# Altium footprint library PcbLib1.PcbLib: 75 footprints (part 1 of 5)
Each footprint in its own frame and in the unit in brackets; x right, y up, seen from the top. Pads: shape width x height; smd on the part's side, far side on the other; paste and mask are expansions set on the pad; w line width, h text height; cw(c..) or ccw(c..) is an arc to the next point about the centre after c.
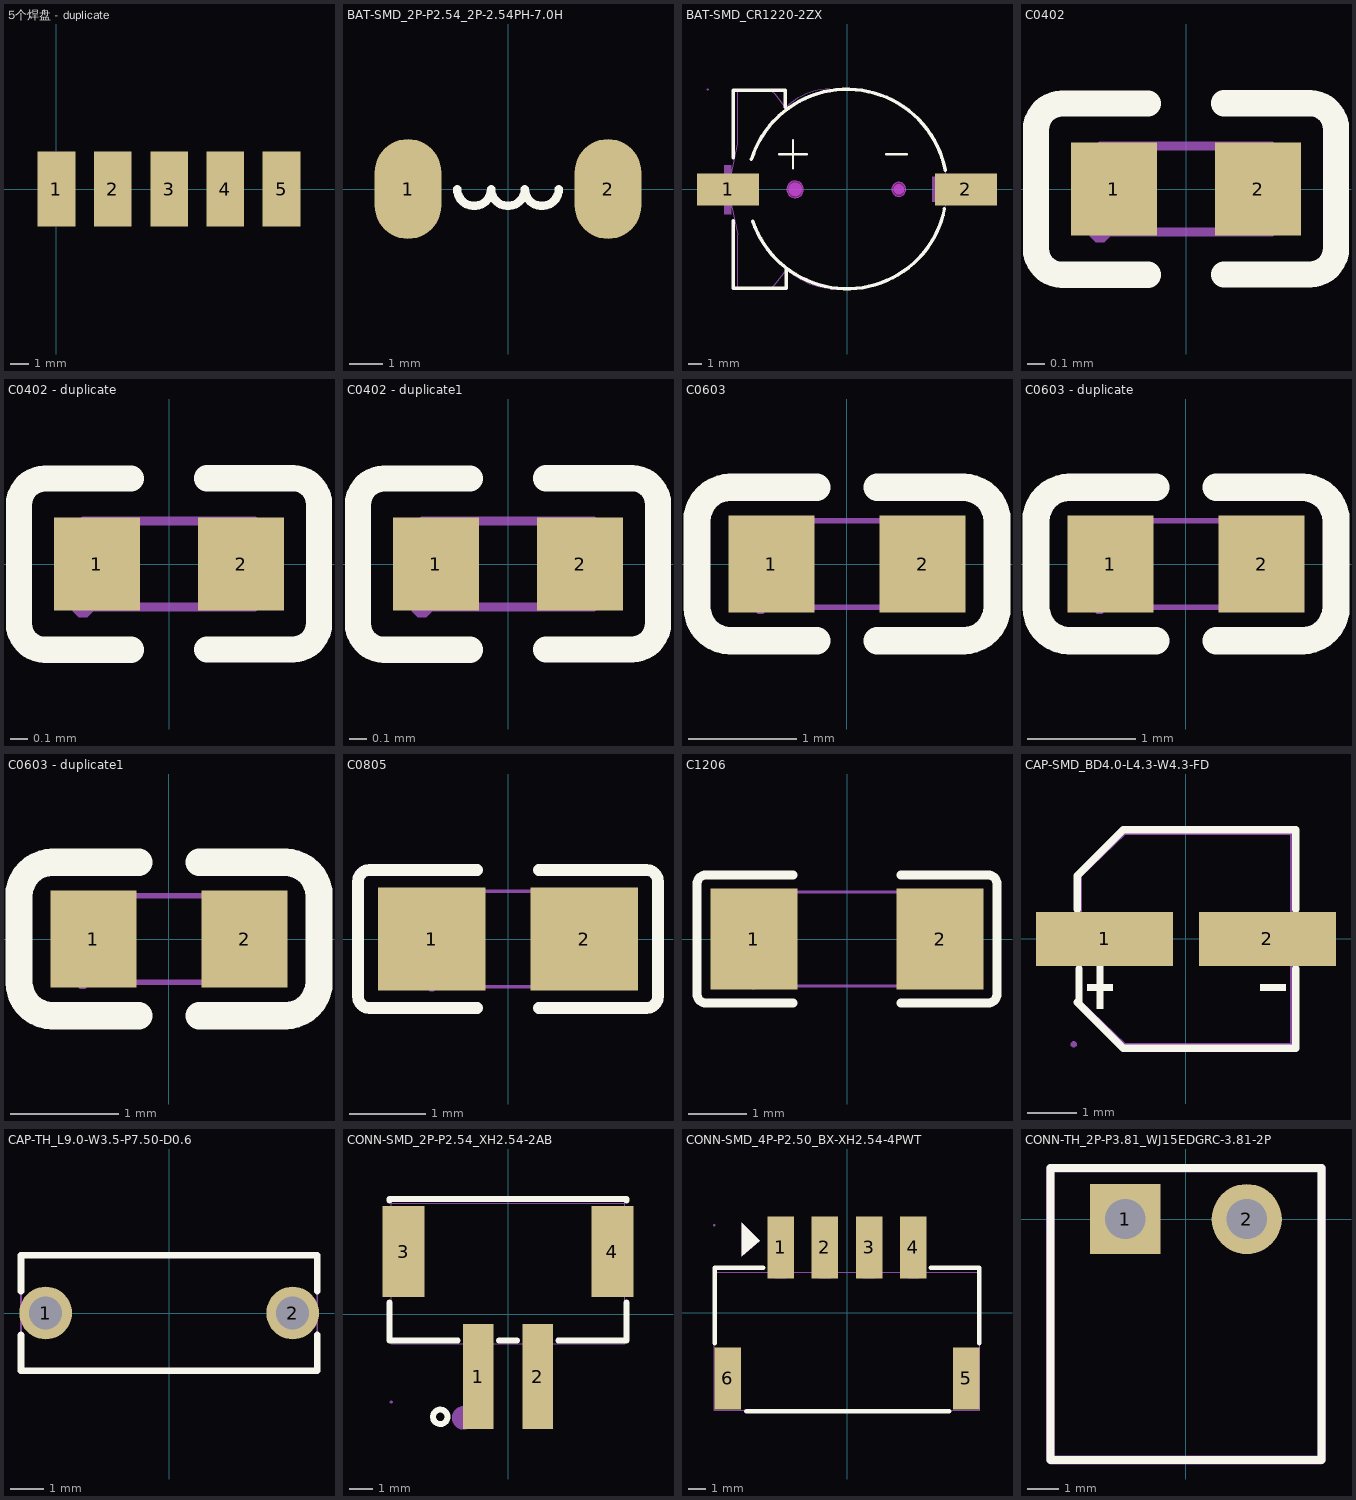
[diagram p0: the footprints below, top view; thin cyan lines are the x and y axes]

## 5个焊盘 - duplicate [mm]
pads (5):
  rect 2x4 smd: 1(0,0) 2(3,0) 3(6.001,0) 4(9,0) 5(12,0)

## BAT-SMD_2P-P2.54_2P-2.54PH-7.0H [mm]
pads (2):
  oval 2x3 smd paste+0 mask+0.05: 1(-3,0) 2(3,0)
Top Overlay:
  lines w0.254: -1.524,0 ccw(c-1.016,0) -0.508,0 ccw(c0,0) 0.508,0 ccw(c1.016,0) 1.524,0

## BAT-SMD_CR1220-2ZX [mm]
pads (2):
  rect 4.5x2.3 smd: 1(-8.6,0) 2(8.6,0)
Top Overlay:
  lines w0.152: -4.928,2.54 -2.896,2.54 ; -3.912,1.524 -3.912,3.556 ; 2.819,2.54 4.343,2.54
  lines w0.254: -8.24,-2.26 -8.24,-7.15 -4.4,-7.15 -4.4,-5.706 -4.378,-5.706 ; -8.24,2.3 -8.24,7.17 -5.51,7.17 -4.47,7.17 -4.47,5.95 ; -6.911,2.175 cw(c0,0) 7.109,1.399 ; -6.815,-2.297 ccw(c0,0) 7.051,-1.418
Keep-Out Layer:
  board cut-out: 4.25,0 4.25,-0.099 4.174,-0.283 4.033,-0.424 3.85,-0.5 3.651,-0.5 3.467,-0.424 3.326,-0.283 3.25,-0.099 3.25,0 3.25,0.099 3.326,0.283 3.467,0.424 3.651,0.5 3.85,0.5 4.033,0.424 4.174,0.283 4.25,0.099 4.25,0
  board cut-out: -3.15,0 -3.15,-0.119 -3.241,-0.34 -3.41,-0.509 -3.631,-0.6 -3.869,-0.6 -4.09,-0.509 -4.259,-0.34 -4.35,-0.119 -4.35,0 -4.35,0.119 -4.259,0.34 -4.09,0.509 -3.869,0.6 -3.631,0.6 -3.41,0.509 -3.241,0.34 -3.15,0.119 -3.15,0
Keep-Out Layer:
  circle w0.003: c3.75,0 r0.5
  circle w0.003: c-3.75,0 r0.6
  region: 4.25,0 4.25,-0.099 4.174,-0.283 4.033,-0.424 3.85,-0.5 3.651,-0.5 3.467,-0.424 3.326,-0.283 3.25,-0.099 3.25,0 3.25,0.099 3.326,0.283 3.467,0.424 3.651,0.5 3.85,0.5 4.033,0.424 4.174,0.283 4.25,0.099 4.25,0
  region: 4.25,0 4.24,-0.098 4.212,-0.191 4.166,-0.278 4.104,-0.354 4.028,-0.416 3.941,-0.462 3.848,-0.49 3.75,-0.5 3.653,-0.49 3.559,-0.462 3.472,-0.416 3.397,-0.354 3.334,-0.278 3.288,-0.191 3.26,-0.098 3.25,0 3.26,0.098 3.288,0.191 3.334,0.278 3.397,0.354 3.472,0.416 3.559,0.462 3.653,0.49 3.75,0.5 3.848,0.49 3.941,0.462 4.028,0.416 4.104,0.354 4.166,0.278 4.212,0.191 4.24,0.098
  region: -3.15,0 -3.15,-0.119 -3.241,-0.34 -3.41,-0.509 -3.631,-0.6 -3.869,-0.6 -4.09,-0.509 -4.259,-0.34 -4.35,-0.119 -4.35,0 -4.35,0.119 -4.259,0.34 -4.09,0.509 -3.869,0.6 -3.631,0.6 -3.41,0.509 -3.241,0.34 -3.15,0.119 -3.15,0
  region: -3.15,0 -3.159,-0.104 -3.186,-0.205 -3.23,-0.3 -3.29,-0.386 -3.364,-0.46 -3.45,-0.52 -3.545,-0.564 -3.646,-0.591 -3.75,-0.6 -3.854,-0.591 -3.955,-0.564 -4.05,-0.52 -4.136,-0.46 -4.21,-0.386 -4.27,-0.3 -4.314,-0.205 -4.341,-0.104 -4.35,0 -4.341,0.104 -4.314,0.205 -4.27,0.3 -4.21,0.386 -4.136,0.46 -4.05,0.52 -3.955,0.564 -3.854,0.591 -3.75,0.6 -3.646,0.591 -3.545,0.564 -3.45,0.52 -3.364,0.46 -3.29,0.386 -3.23,0.3 -3.186,0.205 -3.159,0.104
Mechanical 1:
  circle w0.003: c3.75,0 r0.5
  circle w0.003: c-3.75,0 r0.6
Mechanical 2:
  drawing of 9 lines, arcs and shapes, not listed
Mechanical 6:
  lines w0.051: -8.382,-1.016 -8.382,1.016 -7.89,3.3 -7.89,7.15 -5.47,7.15 -5.2,6.88 -4.47,5.92 -4.43,5.92 cw(c-1.232,2.722) -1.232,7.245 0.081,7.245 cw(c0.081,0.08) 7.245,0.08 7.245,0 cw(c0.053,0) 0.053,-7.192 0,-7.192 -0.843,-7.192 cw(c-0.843,-2.281) -4.315,-5.754 -5.26,-6.93 -5.48,-7.15 -7.89,-7.15 -7.89,-3.3 -8.38,-1.07 -8.382,-1.016
Mechanical 8:
  region: -10.01,7.215 -10.01,7.19 -10.045,7.155 -10.095,7.155 -10.13,7.19 -10.13,7.215 -10.13,7.24 -10.095,7.275 -10.045,7.275 -10.01,7.24 -10.01,7.215
Mechanical 9:
  region: -6.57,-0.9 -10.07,-0.9 -10.07,0.9 -6.57,0.9
  region: 6.17,0.9 9.67,0.9 9.67,-0.9 6.17,-0.9

## C0402 [mm]
pads (2):
  rect 0.5x0.54 smd: 1(-0.42,0) 2(0.42,0)
Top Overlay:
  lines w0.152: -0.221,-0.5 -0.721,-0.5 cw(c-0.721,-0.347) -0.874,-0.347 -0.874,0.345 cw(c-0.721,0.345) -0.721,0.498 -0.221,0.498 ; 0.221,-0.498 0.721,-0.498 ccw(c0.721,-0.345) 0.874,-0.345 0.874,0.347 ccw(c0.721,0.347) 0.721,0.5 0.221,0.5
Mechanical 6:
  lines w0.051: -0.5,-0.25 0.5,-0.25 0.5,0.25 -0.5,0.25 -0.5,-0.25
Mechanical 8:
  region: -0.44,-0.25 -0.44,-0.275 -0.475,-0.31 -0.525,-0.31 -0.56,-0.275 -0.56,-0.25 -0.56,-0.225 -0.525,-0.19 -0.475,-0.19 -0.44,-0.225 -0.44,-0.25
Mechanical 9:
  region: 0.5,-0.25 0.5,0.25 0.25,0.25 0.25,-0.25
  region: -0.5,-0.25 -0.5,0.25 -0.25,0.25 -0.25,-0.25

## C0402 - duplicate [mm]
pads (2):
  rect 0.5x0.54 smd: 1(-0.42,0) 2(0.42,0)
Top Overlay:
  lines w0.152: -0.221,-0.5 -0.721,-0.5 cw(c-0.721,-0.347) -0.874,-0.347 -0.874,0.345 cw(c-0.721,0.345) -0.721,0.498 -0.221,0.498 ; 0.221,-0.498 0.721,-0.498 ccw(c0.721,-0.345) 0.874,-0.345 0.874,0.347 ccw(c0.721,0.347) 0.721,0.5 0.221,0.5
Mechanical 6:
  lines w0.051: -0.5,-0.25 0.5,-0.25 0.5,0.25 -0.5,0.25 -0.5,-0.25
Mechanical 8:
  region: -0.44,-0.25 -0.44,-0.275 -0.475,-0.31 -0.525,-0.31 -0.56,-0.275 -0.56,-0.25 -0.56,-0.225 -0.525,-0.19 -0.475,-0.19 -0.44,-0.225 -0.44,-0.25
Mechanical 9:
  region: 0.5,-0.25 0.5,0.25 0.25,0.25 0.25,-0.25
  region: -0.5,-0.25 -0.5,0.25 -0.25,0.25 -0.25,-0.25

## C0402 - duplicate1 [mm]
pads (2):
  rect 0.5x0.54 smd: 1(-0.42,0) 2(0.42,0)
Top Overlay:
  lines w0.152: -0.221,-0.5 -0.721,-0.5 cw(c-0.721,-0.347) -0.874,-0.347 -0.874,0.345 cw(c-0.721,0.345) -0.721,0.498 -0.221,0.498 ; 0.221,-0.498 0.721,-0.498 ccw(c0.721,-0.345) 0.874,-0.345 0.874,0.347 ccw(c0.721,0.347) 0.721,0.5 0.221,0.5
Mechanical 6:
  lines w0.051: -0.5,-0.25 0.5,-0.25 0.5,0.25 -0.5,0.25 -0.5,-0.25
Mechanical 8:
  region: -0.44,-0.25 -0.44,-0.275 -0.475,-0.31 -0.525,-0.31 -0.56,-0.275 -0.56,-0.25 -0.56,-0.225 -0.525,-0.19 -0.475,-0.19 -0.44,-0.225 -0.44,-0.25
Mechanical 9:
  region: 0.5,-0.25 0.5,0.25 0.25,0.25 0.25,-0.25
  region: -0.5,-0.25 -0.5,0.25 -0.25,0.25 -0.25,-0.25

## C0603 [mm]
pads (2):
  rect 0.8x0.9 smd: 1(-0.7,0) 2(0.7,0)
Top Overlay:
  lines w0.254: -1.08,-0.71 -0.28,-0.71 ; -1.08,0.71 -0.28,0.71 ; -1.08,-0.71 cw(c-1.08,-0.4) -1.39,-0.4 -1.39,0.4 cw(c-1.08,0.4) -1.08,0.71 ; 0.28,-0.71 1.08,-0.71 ccw(c1.08,-0.4) 1.39,-0.4 1.39,0.4 ccw(c1.08,0.4) 1.08,0.71 0.28,0.71
Mechanical 6:
  lines w0.051: -0.8,-0.4 -0.8,0.4 0.8,0.4 0.8,-0.4 -0.8,-0.4
Mechanical 8:
  region: -0.74,-0.4 -0.74,-0.425 -0.775,-0.46 -0.825,-0.46 -0.86,-0.425 -0.86,-0.4 -0.86,-0.375 -0.825,-0.34 -0.775,-0.34 -0.74,-0.375 -0.74,-0.4
Mechanical 9:
  region: -0.8,-0.4 -0.8,0.4 -0.5,0.4 -0.5,-0.4
  region: 0.8,-0.4 0.8,0.4 0.5,0.4 0.5,-0.4

## C0603 - duplicate [mm]
pads (2):
  rect 0.8x0.9 smd: 1(-0.7,0) 2(0.7,0)
Top Overlay:
  lines w0.254: -1.08,-0.71 -0.28,-0.71 ; -1.08,0.71 -0.28,0.71 ; -1.08,-0.71 cw(c-1.08,-0.4) -1.39,-0.4 -1.39,0.4 cw(c-1.08,0.4) -1.08,0.71 ; 0.28,-0.71 1.08,-0.71 ccw(c1.08,-0.4) 1.39,-0.4 1.39,0.4 ccw(c1.08,0.4) 1.08,0.71 0.28,0.71
Mechanical 6:
  lines w0.051: -0.8,-0.4 0.8,-0.4 0.8,0.4 -0.8,0.4 -0.8,-0.4
Mechanical 8:
  region: -0.74,-0.4 -0.74,-0.425 -0.775,-0.46 -0.825,-0.46 -0.86,-0.425 -0.86,-0.4 -0.86,-0.375 -0.825,-0.34 -0.775,-0.34 -0.74,-0.375 -0.74,-0.4
Mechanical 9:
  region: 0.8,-0.4 0.8,0.4 0.5,0.4 0.5,-0.4
  region: -0.8,-0.4 -0.8,0.4 -0.5,0.4 -0.5,-0.4

## C0603 - duplicate1 [mm]
pads (2):
  rect 0.8x0.9 smd: 1(-0.7,0) 2(0.7,0)
Top Overlay:
  lines w0.254: -1.08,-0.71 -0.28,-0.71 ; -1.08,0.71 -0.28,0.71 ; -1.08,-0.71 cw(c-1.08,-0.4) -1.39,-0.4 -1.39,0.4 cw(c-1.08,0.4) -1.08,0.71 ; 0.28,-0.71 1.08,-0.71 ccw(c1.08,-0.4) 1.39,-0.4 1.39,0.4 ccw(c1.08,0.4) 1.08,0.71 0.28,0.71
Mechanical 6:
  lines w0.051: -0.8,-0.4 0.8,-0.4 0.8,0.4 -0.8,0.4 -0.8,-0.4
Mechanical 8:
  region: -0.74,-0.4 -0.74,-0.425 -0.775,-0.46 -0.825,-0.46 -0.86,-0.425 -0.86,-0.4 -0.86,-0.375 -0.825,-0.34 -0.775,-0.34 -0.74,-0.375 -0.74,-0.4
Mechanical 9:
  region: 0.8,-0.4 0.8,0.4 0.5,0.4 0.5,-0.4
  region: -0.8,-0.4 -0.8,0.4 -0.5,0.4 -0.5,-0.4

## C0805 [mm]
pads (2):
  rect 1.41x1.35 smd paste-100 mask+0.051: 1(-1,0) 2(1,0)
Top Overlay:
  lines w0.152: -0.401,-0.904 -1.811,-0.904 cw(c-1.811,-0.751) -1.964,-0.751 -1.964,0.751 cw(c-1.811,0.751) -1.811,0.904 -0.401,0.904 ; 0.401,-0.904 1.811,-0.904 ccw(c1.811,-0.751) 1.964,-0.751 1.964,0.751 ccw(c1.811,0.751) 1.811,0.904 0.401,0.904
Top Paste:
  region: 1.705,0.64 1.705,-0.64 1.655,-0.69 0.505,-0.69 0.455,-0.64 0.45,-0.23 0.9,-0.23 0.9,0.22 0.46,0.22 0.455,0.64 0.505,0.69 1.655,0.69
  region: -1.705,-0.64 -1.705,0.64 -1.655,0.69 -0.505,0.69 -0.455,0.64 -0.45,0.23 -0.9,0.23 -0.9,-0.22 -0.46,-0.22 -0.455,-0.64 -0.505,-0.69 -1.655,-0.69
Mechanical 6:
  lines w0.051: -1,-0.625 1,-0.625 1,0.625 -1,0.625 -1,-0.625
Mechanical 8:
  region: -0.94,-0.625 -0.94,-0.65 -0.975,-0.685 -1.025,-0.685 -1.06,-0.65 -1.06,-0.625 -1.06,-0.6 -1.025,-0.565 -0.975,-0.565 -0.94,-0.6 -0.94,-0.625
Mechanical 9:
  region: 1,0.625 1,-0.625 0.5,-0.625 0.5,0.625
  region: -1,-0.625 -1,0.625 -0.5,0.625 -0.5,-0.625

## C1206 [mm]
pads (2):
  rect 1.485x1.728 smd paste-100 mask+0.051: 1(-1.593,0) 2(1.593,0)
Top Overlay:
  lines w0.152: -0.926,-1.093 -2.411,-1.093 cw(c-2.411,-0.94) -2.564,-0.94 -2.564,0.94 cw(c-2.411,0.94) -2.411,1.093 -0.926,1.093 ; 0.926,-1.093 2.411,-1.093 ccw(c2.411,-0.94) 2.564,-0.94 2.564,0.94 ccw(c2.411,0.94) 2.411,1.093 0.926,1.093
Top Paste:
  region: 0.85,-0.764 0.85,-0.394 0.95,-0.294 1.255,-0.294 1.355,-0.194 1.355,0.194 1.255,0.294 0.95,0.294 0.85,0.394 0.85,0.764 0.95,0.864 2.235,0.864 2.335,0.764 2.335,-0.764 2.235,-0.864 0.95,-0.864
  region: -0.85,-0.764 -0.85,-0.394 -0.95,-0.294 -1.255,-0.294 -1.355,-0.194 -1.355,0.194 -1.255,0.294 -0.95,0.294 -0.85,0.394 -0.85,0.764 -0.95,0.864 -2.235,0.864 -2.335,0.764 -2.335,-0.764 -2.235,-0.864 -0.95,-0.864
Mechanical 6:
  lines w0.051: -1.6,-0.8 -1.6,0.8 1.6,0.8 1.6,-0.8 -1.6,-0.8
Mechanical 8:
  region: -1.54,-0.8 -1.54,-0.825 -1.575,-0.86 -1.625,-0.86 -1.66,-0.825 -1.66,-0.8 -1.66,-0.775 -1.625,-0.74 -1.575,-0.74 -1.54,-0.775 -1.54,-0.8
Mechanical 9:
  region: -1.6,-0.8 -1.6,0.8 -1.1,0.8 -1.1,-0.8
  region: 1.6,-0.8 1.6,0.8 1.1,0.8 1.1,-0.8

## CAP-SMD_BD4.0-L4.3-W4.3-FD [mm]
pads (2):
  rect 2.8x1.1 smd: 1(-1.661,0) 2(1.661,0)
Top Overlay:
  region: 2.031,-0.925 2.031,-1.054 1.515,-1.054 1.515,-0.925
  region: -2.011,-0.925 -2.011,-1.054 -1.495,-1.054 -1.495,-0.925
  region: -1.818,-0.559 -1.818,-1.419 -1.689,-1.419 -1.689,-0.559
  lines w0.152: -2.217,-1.29 -1.28,-2.226 2.236,-2.226 2.236,-0.607 ; -2.217,0.607 -2.217,1.29 -1.28,2.226 2.236,2.226 2.236,0.607 ; -2.183,-1.29 -2.183,-0.607
Mechanical 2:
  region: 2.031,0.064 2.031,-0.065 1.515,-0.065 1.515,0.064
  region: -2.011,0.064 -2.011,-0.065 -1.495,-0.065 -1.495,0.064
  region: -1.818,0.43 -1.818,-0.43 -1.689,-0.43 -1.689,0.43
Mechanical 6:
  lines w0.051: -2.15,-1.281 -1.248,-2.15 2.15,-2.15 2.15,2.15 -1.248,2.15 -2.15,1.281 -2.15,-1.281
Mechanical 8:
  region: -2.23,-2.15 -2.23,-2.175 -2.266,-2.21 -2.315,-2.21 -2.35,-2.175 -2.35,-2.15 -2.35,-2.125 -2.315,-2.09 -2.266,-2.09 -2.23,-2.125 -2.23,-2.15
Mechanical 9:
  region: 2.31,0.325 2.31,-0.325 0.51,-0.325 0.51,0.325
  region: -2.29,0.325 -2.29,-0.325 -0.49,-0.325 -0.49,0.325

## CAP-TH_L9.0-W3.5-P7.50-D0.6 [mm]
pads (2):
  round 1.6 hole 1: 1(-3.75,0) 2(3.75,0)
Top Overlay:
  lines w0.2: -4.5,-0.666 -4.5,-1.75 4.5,-1.75 4.5,-0.666 ; -4.5,0.666 -4.5,1.75 4.5,1.75 4.5,0.666
Mechanical 6:
  lines w0.051: -4.5,-1.75 -4.5,1.75 4.5,1.75 4.5,-1.75 -4.5,-1.75
Mechanical 8:
  region: -4.44,-1.75 -4.44,-1.775 -4.475,-1.81 -4.525,-1.81 -4.56,-1.775 -4.56,-1.75 -4.56,-1.725 -4.525,-1.69 -4.475,-1.69 -4.44,-1.725 -4.44,-1.75
Mechanical 9:
  region: -3.45,0 -3.45,-0.06 -3.496,-0.17 -3.58,-0.254 -3.69,-0.3 -3.81,-0.3 -3.92,-0.254 -4.004,-0.17 -4.05,-0.06 -4.05,0 -4.05,0.06 -4.004,0.17 -3.92,0.254 -3.81,0.3 -3.69,0.3 -3.58,0.254 -3.496,0.17 -3.45,0.06 -3.45,0
  region: 4.05,0 4.05,-0.06 4.004,-0.17 3.92,-0.254 3.81,-0.3 3.69,-0.3 3.58,-0.254 3.496,-0.17 3.45,-0.06 3.45,0 3.45,0.06 3.496,0.17 3.58,0.254 3.69,0.3 3.81,0.3 3.92,0.254 4.004,0.17 4.05,0.06 4.05,0

## CONN-SMD_2P-P2.54_XH2.54-2AB [mm]
pads (4):
  rect 1.3x4.5 smd: 1(-1.269,-2.675) 2(1.27,-2.675)
  rect 1.8x3.9 smd: 3(-4.47,2.675) 4(4.47,2.675)
Top Overlay:
  circle w0.254: c-2.9,-4.4 r0.31
  lines w0.254: -5.078,0.493 -5.078,-1.135 -2.151,-1.135 ; -5.078,4.857 -5.078,4.925 5.08,4.925 5.08,4.857 ; -0.388,-1.135 0.389,-1.135 ; 2.152,-1.135 5.08,-1.135 5.08,0.493
Mechanical 2:
  circle w0.5: c-1.905,-4.445 r0.25
Mechanical 6:
  lines w0.051: -5,-1.27 5,-1.27 5,4.73 -5,4.73 -5,-1.27
Mechanical 8:
  region: -4.94,-3.77 -4.94,-3.795 -4.975,-3.83 -5.025,-3.83 -5.06,-3.795 -5.06,-3.77 -5.06,-3.745 -5.025,-3.71 -4.975,-3.71 -4.94,-3.745 -4.94,-3.77
Mechanical 9:
  region: -4.72,3.925 -4.22,3.925 -4.22,1.425 -4.72,1.425
  region: 4.22,3.925 4.72,3.925 4.72,1.425 4.22,1.425
  region: 0.95,-1.22 1.59,-1.22 1.59,-3.77 0.95,-3.77
  region: -1.589,-1.22 -0.949,-1.22 -0.949,-3.77 -1.589,-3.77

## CONN-SMD_4P-P2.50_BX-XH2.54-4PWT [mm]
pads (6):
  rect 1.5x3.5 smd paste+0 mask+0.05: 1(-3.75,3.7) 2(-1.25,3.7) 3(1.25,3.7) 4(3.75,3.7) 5(6.73,-3.7) 6(-6.73,-3.7)
Top Overlay:
  region: -4.946,4.081 -5.962,5.097 -5.962,3.192
  lines w0.254: -7.486,-1.719 -7.486,2.557 -4.731,2.557 ; -5.708,-5.571 5.783,-5.571 ; 4.73,2.558 6.389,2.558 7.486,2.558 7.486,-1.719
Mechanical 2:
  region: -4.946,4.081 -5.962,5.097 -5.962,3.192
Mechanical 6:
  lines w0.051: -7.5,-5.502 -7.5,2.298 7.5,2.298 7.5,-5.502 -7.5,-5.502
Mechanical 8:
  region: -7.44,4.95 -7.44,4.925 -7.475,4.89 -7.525,4.89 -7.56,4.925 -7.56,4.95 -7.56,4.975 -7.525,5.01 -7.475,5.01 -7.44,4.975 -7.44,4.95
Mechanical 9:
  region: -4.07,4.95 -3.43,4.95 -3.43,1.95 -4.07,1.95
  region: -1.57,4.95 -0.93,4.95 -0.93,1.95 -1.57,1.95
  region: 0.93,4.95 1.57,4.95 1.57,1.95 0.93,1.95
  region: 3.43,4.95 4.07,4.95 4.07,1.95 3.43,1.95
  region: -6.93,-2.45 -6.53,-2.45 -6.53,-4.95 -6.93,-4.95
  region: 6.53,-2.45 6.93,-2.45 6.93,-4.95 6.53,-4.95

## CONN-TH_2P-P3.81_WJ15EDGRC-3.81-2P [mm]
pads (2):
  rect 2.2x2.2 hole 1.26: 1(-1.905,0)
  round 2.2 hole 1.26: 2(1.905,0)
Top Overlay:
  lines w0.254: -4.25,-7.55 -4.25,1.6 4.25,1.6 4.25,-7.55 -4.25,-7.55
Mechanical 2:
  region: -4.123,1.6 -4.123,-7.423 4.123,-7.423 4.123,1.6 4.133,1.649 4.16,1.69 4.201,1.717 4.25,1.727 4.299,1.717 4.34,1.69 4.367,1.649 4.377,1.6 4.377,-7.55 4.367,-7.599 4.34,-7.64 4.299,-7.667 4.25,-7.677 -4.25,-7.677 -4.299,-7.667 -4.34,-7.64 -4.367,-7.599 -4.377,-7.55 -4.377,1.6 -4.367,1.649 -4.34,1.69 -4.299,1.717 -4.25,1.727 -4.201,1.717 -4.16,1.69 -4.133,1.649
  region: 4.25,1.473 -4.25,1.473 -4.299,1.483 -4.34,1.51 -4.367,1.551 -4.377,1.6 -4.367,1.649 -4.34,1.69 -4.299,1.717 -4.25,1.727 4.25,1.727 4.299,1.717 4.34,1.69 4.367,1.649 4.377,1.6 4.367,1.551 4.34,1.51 4.299,1.483
Mechanical 6:
  lines w0.051: -4.25,-7.55 -4.25,1.6 4.25,1.6 4.25,-7.55 -4.25,-7.55
Mechanical 8:
  region: -4.19,-7.55 -4.19,-7.575 -4.225,-7.61 -4.275,-7.61 -4.31,-7.575 -4.31,-7.55 -4.31,-7.525 -4.275,-7.49 -4.225,-7.49 -4.19,-7.525 -4.19,-7.55
Mechanical 9:
  region: 1.505,0.4 2.305,0.4 2.305,-0.4 1.505,-0.4
  region: -2.305,0.4 -1.505,0.4 -1.505,-0.4 -2.305,-0.4